# EAGLE library part 6130XX143121_613013143121 (library WR-PHD)
WR-PHD 2.54 mm Angled Socket Header Article Properties Pins 2 unitless; 3 unitless; 4 unitless; 5 unitless; 6 unitless; 7 unitless; 8 unitless; 9 unitless; 10 unitless; 12 unitless; 13 unitless; 15 unitless; 16 unitless; 18 unitless; 20 unitless; 24 unitless; 32 unitless General Information Operating Temperature -40 °C up to +105 °C Pitch 2.54 mm Durability 25 Mating cycles Rows Single Gender Socket Header Type Angled Material Properties Insulator Material PBT Insulator Flammability Rating UL94 V-0 Contact Material Copper Alloy Contact Plating Gold Contact Type Stamped Certification UL Approval E323964 Packaging Properties Packaging Tray Electrical Properties Withstanding Voltage 500 V (AC) Contact Resistance 20 mΩ RISO 1000 MΩ <https://www.we-online.com/components/media/o33212v209%20Family_WR-PHD_6130xx143121.jpg> Details see: www.we-online.com/en/components/products/PHD_2_54_ANGLED_SOCKET_HEADER_6130XX143121 <www.we-online.com/catalog/PHD_2_54_ANGLED_SOCKET_HEADER_6130XX143121/?utm_source=eagle_model&utm_medium=description_link&utm_campaign=eisos_eagle> Updated by Yingchun,Shan 2019-10-22 2019 (C) Würth Elektronik
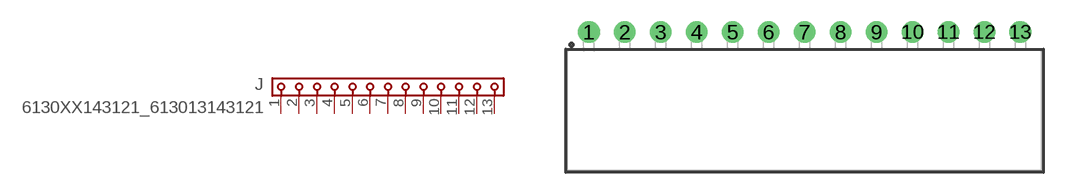
[diagram p91: symbol with the pads of 613013143121; footprint 613013143121]

Designator prefix J

## 6130XX143121_613013143121 (DATASHEET-URL: https://www.we-online.com/redexpert/spec/613013143121?ae; GENDER: Socket Header; IR: 3A; MOUNT: THT; PACKAGING: Tray; PART-NUMBER: 613013143121; PINS: 13; PITCH: 2.54 mm; ROWS: Single; TYPE: Angled; VALUE: 613013143121)  [613013143121]
1  1  pas
2  2  pas
3  3  pas
4  4  pas
5  5  pas
6  6  pas
7  7  pas
8  8  pas
9  9  pas
10  10  pas
11  11  pas
12  12  pas
13  13  pas

## Footprint 613013143121 (pad centres in mm)
WR-PHD 2.54 mm Angled Socket Header, 13 Pins
drill 1.02: 1 -15.24,5.55; 2 -12.7,5.55; 3 -10.16,5.55; 4 -7.62,5.55; 5 -5.08,5.55; 6 -2.54,5.55; 7 0,5.55; 8 2.54,5.55; 9 5.08,5.55; 10 7.62,5.55; 11 10.16,5.55; 12 12.7,5.55; 13 15.24,5.55